# Altium schematic symbol library TPS25940ARVCR.SchLib: 1 symbol
Pins are listed as number, name and electrical type; pins without a type are passive.

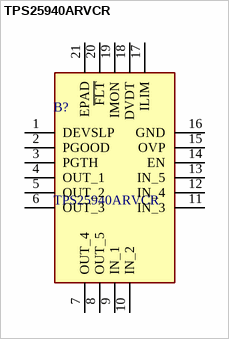
[diagram p0: symbol TPS25940ARVCR]

## TPS25940ARVCR
designator B?
18V, 5A, 42m eFuse With Integrated Reverse Current Protection and DevSleep Support; Manufacturer_Name: Texas Instruments; Geometry.Height: 0.8mm; Manufacturer_Part_Number: TPS25940ARVCR; Mouser Part Number: 595-TPS25940ARVCR; Mouser Price/Stock: https://www.mouser.co.uk/ProductDetail/Texas-Instruments/TPS25940ARVCR?qs=1MXlzafEN38UtOFn%252BxDXYg%3D%3D; Arrow Part Number: TPS25940ARVCR; Arrow Price/Stock: https://www.arrow.com/en/products/tps25940arvcr/texas-instruments.html?utm_currency=USD&region=nac; Datasheet Link: http://www.ti.com/lit/ds/symlink/tps25940.pdf
footprint QFN50P300X400X80-21N
pins: 1 DEVSLP, 2 PGOOD, 3 PGTH, 4 OUT_1, 5 OUT_2, 6 OUT_3, 7 OUT_4, 8 OUT_5, 9 IN_1, 10 IN_2, 11 IN_3, 12 IN_4, 13 IN_5, 14 EN, 15 OVP, 16 GND, 17 ILIM, 18 DVDT, 19 IMON, 20 ~{FLT}, 21 EPAD